# Altium schematic symbol library EEUFR1E101B.SchLib: 1 symbol
Pins are listed as number, name and electrical type; pins without a type are passive.

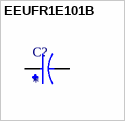
[diagram p0: symbol EEUFR1E101B]

## EEUFR1E101B
designator C?
100ÂµF 25V Aluminum Electrolytic Capacitors Radial, Can 5000 Hrs @ 105Â°C; MF: Panasonic; MP: EEUFR1E101B; Package: RADIAL-2 Panasonic; Price: None; Check_prices: https://www.snapeda.com/parts/EEUFR1E101B/Panasonic/view-part/2618159/?ref=eda; Value: *; SnapEDA_Link: https://www.snapeda.com/parts/EEUFR1E101B/Panasonic/view-part/2618159/?ref=snap; Availability: In Stock
footprint CAPPRD500W50D630H1120
pins: N, P